# Altium footprint library PBL - THD Packages.PcbLib: 160 footprints (part 8 of 10)
Each footprint in its own frame and in the unit in brackets; x right, y up, seen from the top. Pads: shape width x height; smd on the part's side, far side on the other; paste and mask are expansions set on the pad; w line width, h text height; cw(c..) or ccw(c..) is an arc to the next point about the centre after c.
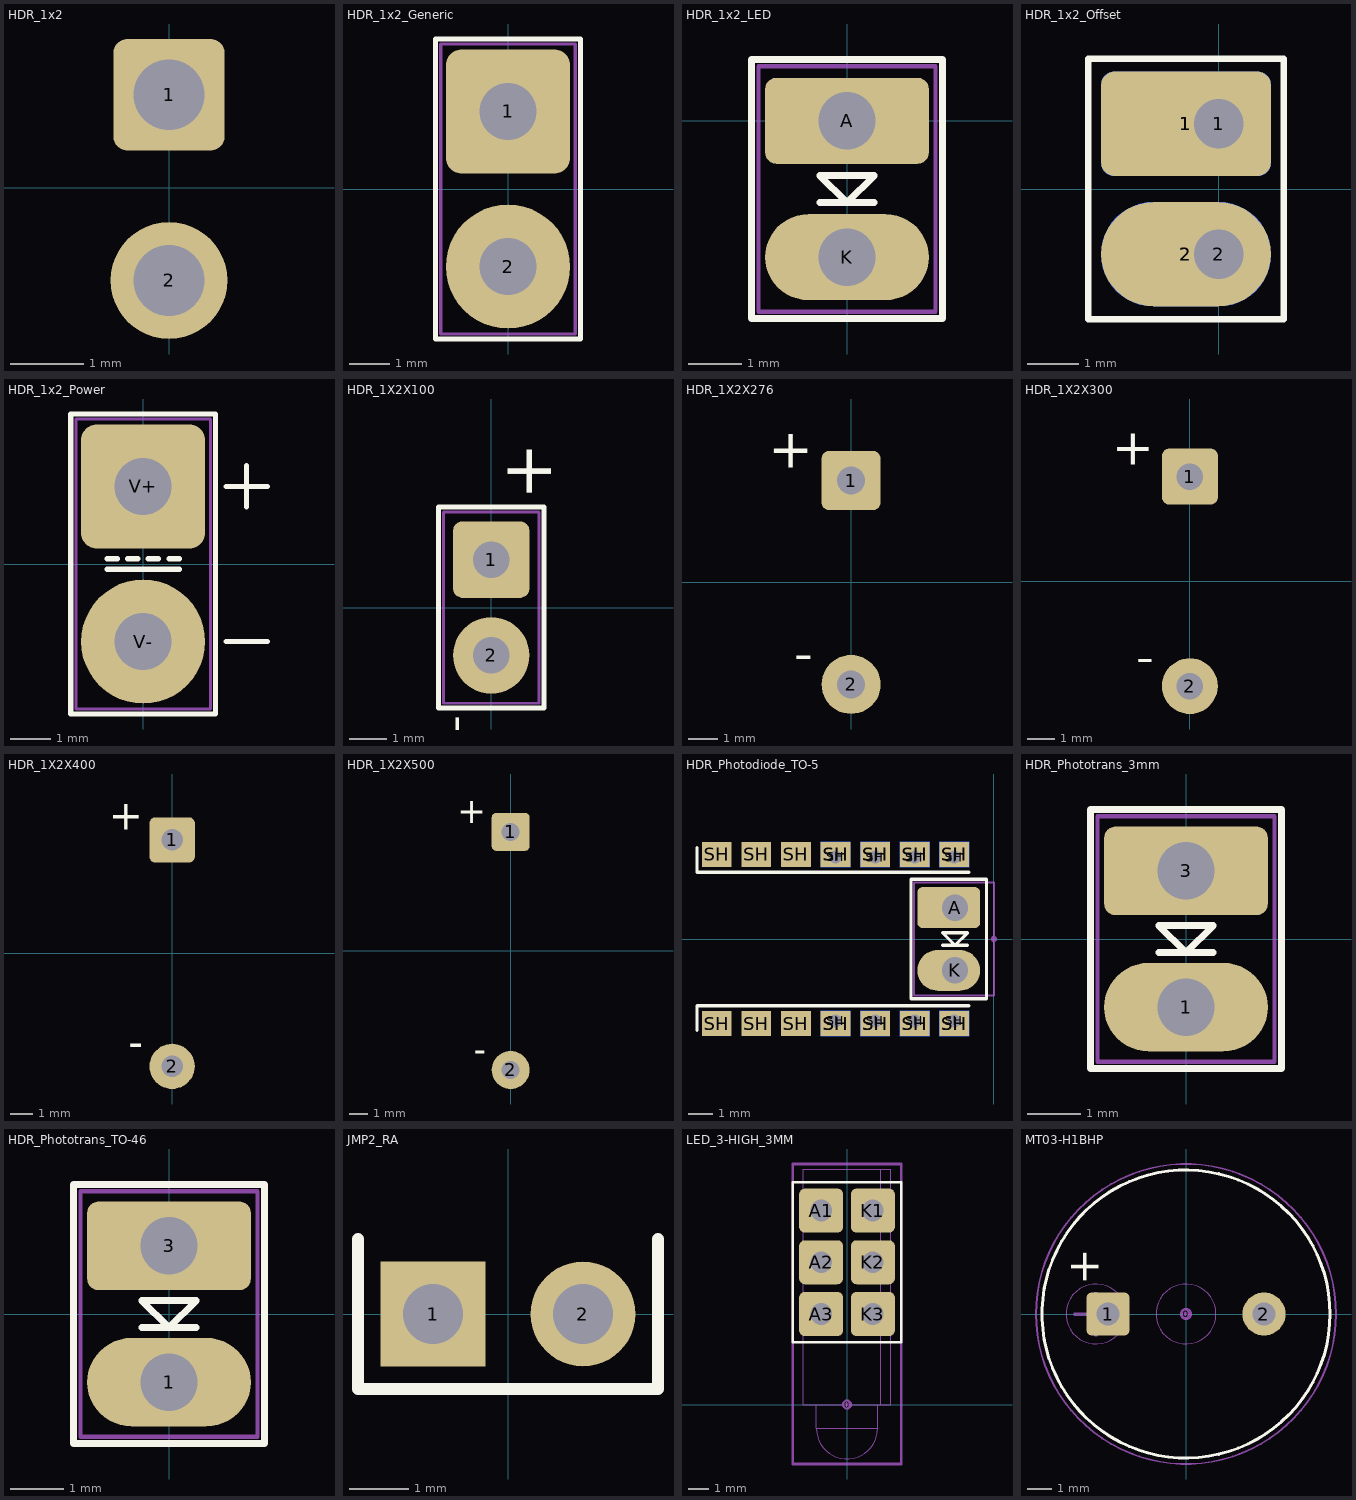
[diagram p7: the footprints below, top view; thin cyan lines are the x and y axes]

## HDR_1x2 [mil]
pads (2):
  rrect25% 60x60 hole 38: 1(0,50)
  round 62.99 hole 38: 2(0,-50)
3D body: height -3, standoff -5, extent -19.84,-19.96 20,19.96

## HDR_1x2_Generic [mil] "Connector Header, Single-row 2-position, 0.200\" pitch"
height 235
pads (2):
  rrect25% 120x120 hole 55: 1(0,75)
  round 120 hole 55: 2(0,-75)
Top Overlay:
  lines w5: -70,-145 -70,145 70,145 70,-145 -70,-145
13 - 3D Top Side:
  lines w3: -65,-140 -65,140 65,140 65,-140 -65,-140

## HDR_1x2_LED [mil] "Connector Header, Single-row 2-position, 0.100\" pitch"
height 235
pads (2):
  rrect25% 120x63 hole 42: A(0,0)
  oval 120x63 hole 42: K(0,-100)
Top Overlay:
  lines w5: -20,-60 20,-60 ; -70,-145 70,-145 70,45 -70,45 -70,-145 ; -20,-40 0,-60 20,-40 -20,-40
13 - 3D Top Side:
  lines w3: -65,-140 65,-140 65,40 -65,40 -65,-140

## HDR_1x2_Offset [mil]
pads (6):
  rrect25% 130x80 smd far side: 1(-25,50)
  rrect25% 130x80 smd: 1(-25,50)
  rrect25% 60x60 hole 38: 1(0,50)
  oval 130x80 smd far side: 2(-25,-50)
  oval 130x80 smd: 2(-25,-50)
  round 60 hole 38: 2(0,-50)
Top Overlay:
  lines w5: -100,-100 -100,100 50,100 50,-100 -100,-100

## HDR_1x2_Power [mil] "Connector Header, Single-row 2-position, 0.200\" pitch"
height 235
pads (2):
  rrect25% 120x120 hole 55: V+(0,75)
  round 120 hole 55: V-(0,-75)
Top Overlay:
  lines w5: -35,-5 35,-5 ; -35,5 -25,5 ; -15,5 -5,5 ; 5,5 15,5 ; 25,5 35,5 ; 80,-75 120,-75 ; 80,75 120,75 ; 100,55 100,95 ; -70,-145 -70,145 70,145 70,-145 -70,-145
13 - 3D Top Side:
  lines w3: -65,-140 -65,140 65,140 65,-140 -65,-140

## HDR_1X2X100 [mil]
pads (2):
  rrect25% 80x80 hole 38: 1(0,50)
  round 80 hole 38: 2(0,-50)
Top Overlay:
  lines w5: -55,-105 -55,105 55,105 55,-105 -55,-105
  text "+" at 0,112.2 h90
  text "-" at 0,-111.22 h90
13 - 3D Top Side:
  lines w3: -50,-100 -50,100 50,100 50,-100 -50,-100
3D body: height -3, standoff -5, extent -19.84,-19.96 20,19.96

## HDR_1X2X276 [mil]
pads (2):
  rrect25% 80x80 hole 38: 1(0,137.8)
  round 80 hole 38: 2(0,-137.8)
Top Overlay:
  text "-" at -51.18,-137.8 h90
  text "+" at -51.18,137.8 h90
Bottom Overlay:
  text "+" at -51.18,137.8 h90
  text "-" at -51.18,-137.8 h90
3D body: height -3, standoff -5, extent -19.84,-157.75 20,-117.83
3D body: height -3, standoff -5, extent -19.84,117.84 20,157.76

## HDR_1X2X300 [mil]
pads (2):
  rrect25% 80x80 hole 38: 1(0,150)
  round 80 hole 38: 2(0,-150)
Top Overlay:
  text "-" at -51.18,-149.61 h90
  text "+" at -51.18,149.61 h90
3D body: height -3, standoff -5, extent -19.84,130.04 20,169.96
3D body: height -3, standoff -5, extent -19.84,-169.96 20,-130.04

## HDR_1X2X400 [mil]
pads (2):
  rrect25% 80x80 hole 38: 1(0,200)
  round 80 hole 38: 2(0,-200)
Top Overlay:
  text "+" at -51.18,200 h90
  text "-" at -51.18,-200 h90
3D body: height -3, standoff -5, extent -19.84,-219.96 20,-180.04
3D body: height -3, standoff -5, extent -19.84,180.04 20,219.96

## HDR_1X2X500 [mil]
pads (2):
  rrect25% 80x80 hole 38: 1(0,250)
  round 80 hole 38: 2(0,-250)
Top Overlay:
  text "-" at -51.18,-250 h90
  text "+" at -51.18,250 h90
3D body: height 1.97, standoff 0, extent -39.68,-289.91 40.01,-210.07
3D body: height 1.97, standoff 0, extent -40,210 40,290

## HDR_Photodiode_TO-5 [mil] "Photodiode TO-5 form, edge straddling"
height 525
pads (33):
  round 10 on Mech15: 0(0,0)
  rrect25% 100x65 hole 42 copper offset -10,0: A(-61.81,50)
  oval 100x65 hole 42 copper offset -10,0: K(-61.81,-50)
  rect 47.24x40 smd: SH(-440.94,-134.49) SH(-440.94,134.5) SH(-377.95,-134.5) SH(-377.95,134.49) SH(-314.96,-134.5) SH(-314.96,134.49) SH(-251.97,-134.49) SH(-251.97,134.51) SH(-188.98,-134.49) SH(-188.98,134.5) SH(-125.99,-134.49) SH(-125.99,134.5) SH(-63,-134.49) SH(-63,134.5)
  rect 47.24x40 smd far side: SH(-251.97,-134.49) SH(-251.97,134.51) SH(-188.98,-134.49) SH(-188.98,134.5) SH(-125.99,-134.49) SH(-125.99,134.5) SH(-63,-134.49) SH(-63,134.5)
  round 32 hole 20: SH(-251.97,-130.49) SH(-251.97,130.51) SH(-188.98,-130.49) SH(-188.98,130.5) SH(-125.99,-130.49) SH(-125.99,130.5) SH(-63,-130.49) SH(-63,130.5)
Top Overlay:
  lines w5: -472.44,-145.66 -472.44,-106.29 -39.37,-106.29 ; -472.44,145.67 -472.44,106.3 -39.37,106.3 ; -81.81,-10 -41.81,-10 ; -131.81,-95 -131.81,95 -11.81,95 -11.81,-95 -131.81,-95 ; -81.81,10 -41.81,10 -61.81,-10 -81.81,10
13 - 3D Top Side:
  lines w3: -126.81,-90 -126.81,90 0,90 0,-90 -126.81,-90
3D body: height 109.1, standoff -172.1, extent -444.88,-140.32 86.62,140.32

## HDR_Phototrans_3mm [mil] "LED 3mm dia lens, 0.100\" pitch"
height 525
pads (2):
  oval 120x65 hole 42: 1(0,-50)
  rrect25% 120x65 hole 42: 3(0,50)
Top Overlay:
  lines w5: -20,-10 20,-10 ; -70,-95 -70,95 70,95 70,-95 -70,-95 ; -20,10 20,10 0,-10 -20,10
13 - 3D Top Side:
  lines w3: -65,-90 -65,90 65,90 65,-90 -65,-90
3D body: height 31, standoff -94.49, extent -249.2,-62.86 516.54,62.87

## HDR_Phototrans_TO-46 [mil] "LED TO-46 form, edge straddling"
height 525
pads (2):
  oval 120x65 hole 42: 1(0,-50)
  rrect25% 120x65 hole 42: 3(0,50)
Top Overlay:
  lines w5: -20,-10 20,-10 ; -70,-95 -70,95 70,95 70,-95 -70,-95 ; -20,10 20,10 0,-10 -20,10
13 - 3D Top Side:
  lines w3: -65,-90 -65,90 65,90 65,-90 -65,-90
3D body: height 77.29, standoff -150.51, extent -8.99,-119.01 546.86,108.79

## JMP2_RA [mil] "2-pin RA jumper, 0.1\" .025 pins"
height 98.43
pads (2):
  rect 70x70 hole 40: 1(-50,0)
  round 70 hole 40: 2(50,0)
Top Overlay:
  lines w8: -100,50 -100,-50 100,-50 100,50
3D body: height 98.43, standoff -129.94, extent -100,-12.5 100,393.7

## LED_3-HIGH_3MM [mil] "LED Circuit Board Indicator Tri-Level"
height 600
pads (7):
  round 20 on Mech15: 0(0,0)
  rrect25% 85x85 hole 42: A1(-50,375) A2(-50,275) A3(-50,175) K1(50,375) K2(50,275) K3(50,175)
Top Overlay:
  lines w5: -105,120 -105,430 105,430 105,120 -105,120
13 - 3D Top Side:
  lines w1.97: -59.06,0 -59.06,-46.06 ; 59.06,0 59.06,-46.06 ; 65.35,0 65.35,455.12 ; -59.06,-46.06 ccw(c0,-46.06) 59.06,-46.06 ; -59.06,-46.06 59.06,-46.06 ; -85.04,0 -85.04,455.12 85.04,455.12 85.04,0 -85.04,0
15 - Top Courtyards:
  lines w5: -105,-115 -105,465 105,465 105,-115 -105,-115
3D body: height 600, standoff -144.88, extent -85.04,-105.11 85.04,455.12

## MT03-H1BHP [mm]
height 10.008
pads (3):
  round 0.508 on Mech15: 0(0,0)
  rrect25% 1.8x1.8 hole 0.965: 1(-3.25,0)
  round 1.8 hole 0.965: 2(3.25,0)
Top Overlay:
  circle w0.127: c0,0 r6
  text "+" at -3.2,1.2 h2.29
13 - 3D Top Side:
  circle w0.05: c0,0 r6.25
  circle w0.05: c-3.75,0 r1.25
  circle w0.05: c0,0 r5.996
  circle w0.05: c0,0 r1.25
  circle w0.076: c0.003,-0.012 r6
  lines w0.05: -4.65,-0.05 -4.65,0.05 ; -4.65,-0.05 -4.625,-0.025 ; -4.65,-0.05 -3.775,-0.05 ; -4.65,0.05 -4.625,0.025 ; -4.65,0.05 -3.775,0.05 ; -4.625,-0.025 -4.625,0.025 ; -4.625,-0.025 -3.8,-0.025 ; -4.625,0.025 -3.8,0.025 ; -3.8,-0.9 -3.8,-0.025 ; -3.8,-0.9 -3.775,-0.875 ; -3.8,-0.9 -3.7,-0.9 ; -3.8,-0.025 cw(c-3.8,-0.05) -3.775,-0.05 ; -3.8,0.025 ccw(c-3.8,0.05) -3.775,0.05 ; -3.8,0.025 -3.8,0.9 ; -3.8,0.9 -3.7,0.9 ; -3.8,0.9 -3.775,0.875 ; -3.775,-0.875 -3.775,-0.05 ; -3.775,-0.875 -3.725,-0.875 ; -3.775,0.05 -3.775,0.875 ; -3.775,0.875 -3.725,0.875 ; -3.725,-0.875 -3.725,-0.05 ; -3.725,-0.875 -3.7,-0.9 ; -3.725,-0.05 cw(c-3.7,-0.05) -3.7,-0.025 ; -3.725,-0.05 -2.85,-0.05 ; -3.725,0.05 ccw(c-3.7,0.05) -3.7,0.025 ; -3.725,0.05 -3.725,0.875 ; -3.725,0.05 -2.85,0.05 ; -3.725,0.875 -3.7,0.9 ; -3.7,-0.9 -3.7,-0.025 ; -3.7,-0.025 -2.875,-0.025 ; -3.7,0.025 -2.875,0.025 ; -3.7,0.025 -3.7,0.9 ; -2.875,-0.025 -2.85,-0.05 ; -2.875,-0.025 -2.875,0.025 ; -2.875,0.025 -2.85,0.05 ; -2.85,-0.05 -2.85,0.05
15 - Top Courtyards:
  circle w0.076: c0,0 r6.25
3D body: height 10, standoff -2.8, extent -6.249,-6.249 6.25,6.25